# Altium integrated library SIM8055-6-1-14-00-A.IntLib: 1 symbol
Pins are listed as number, name and electrical type; pins without a type are passive.

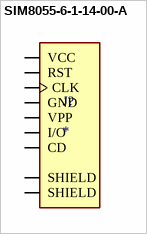
[diagram p0: symbol SIM8055-6-1-14-00-A]

## SIM8055-6-1-14-00-A
designator J?
7 (6 + 1) Position Card Connector NANO SIM Surface Mount, Right Angle Gold; MF: Global Connector Technology; MP: SIM8055-6-1-14-00-A; SnapEDA_Link: https://www.snapeda.com/parts/SIM8055-6-1-14-00-A/Global+Connector+Technology/view-part/?ref=snap; Package: None; Value: *; Check_prices: https://www.snapeda.com/parts/SIM8055-6-1-14-00-A/Global+Connector+Technology/view-part/?ref=eda
footprint GCT_SIM8055-6-1-14-00-A
pins: C1 VCC, C2 RST, C3 CLK, C4 SHIELD, C5 GND, C6 VPP, C7 I/O, C8 SHIELD, CD